# Altium footprint library Package_DFN_QFN.PcbLib: 735 footprints (part 22 of 46)
Each footprint in its own frame and in the unit in brackets; x right, y up, seen from the top. Pads: shape width x height; smd on the part's side, far side on the other; paste and mask are expansions set on the pad; w line width, h text height; cw(c..) or ccw(c..) is an arc to the next point about the centre after c.
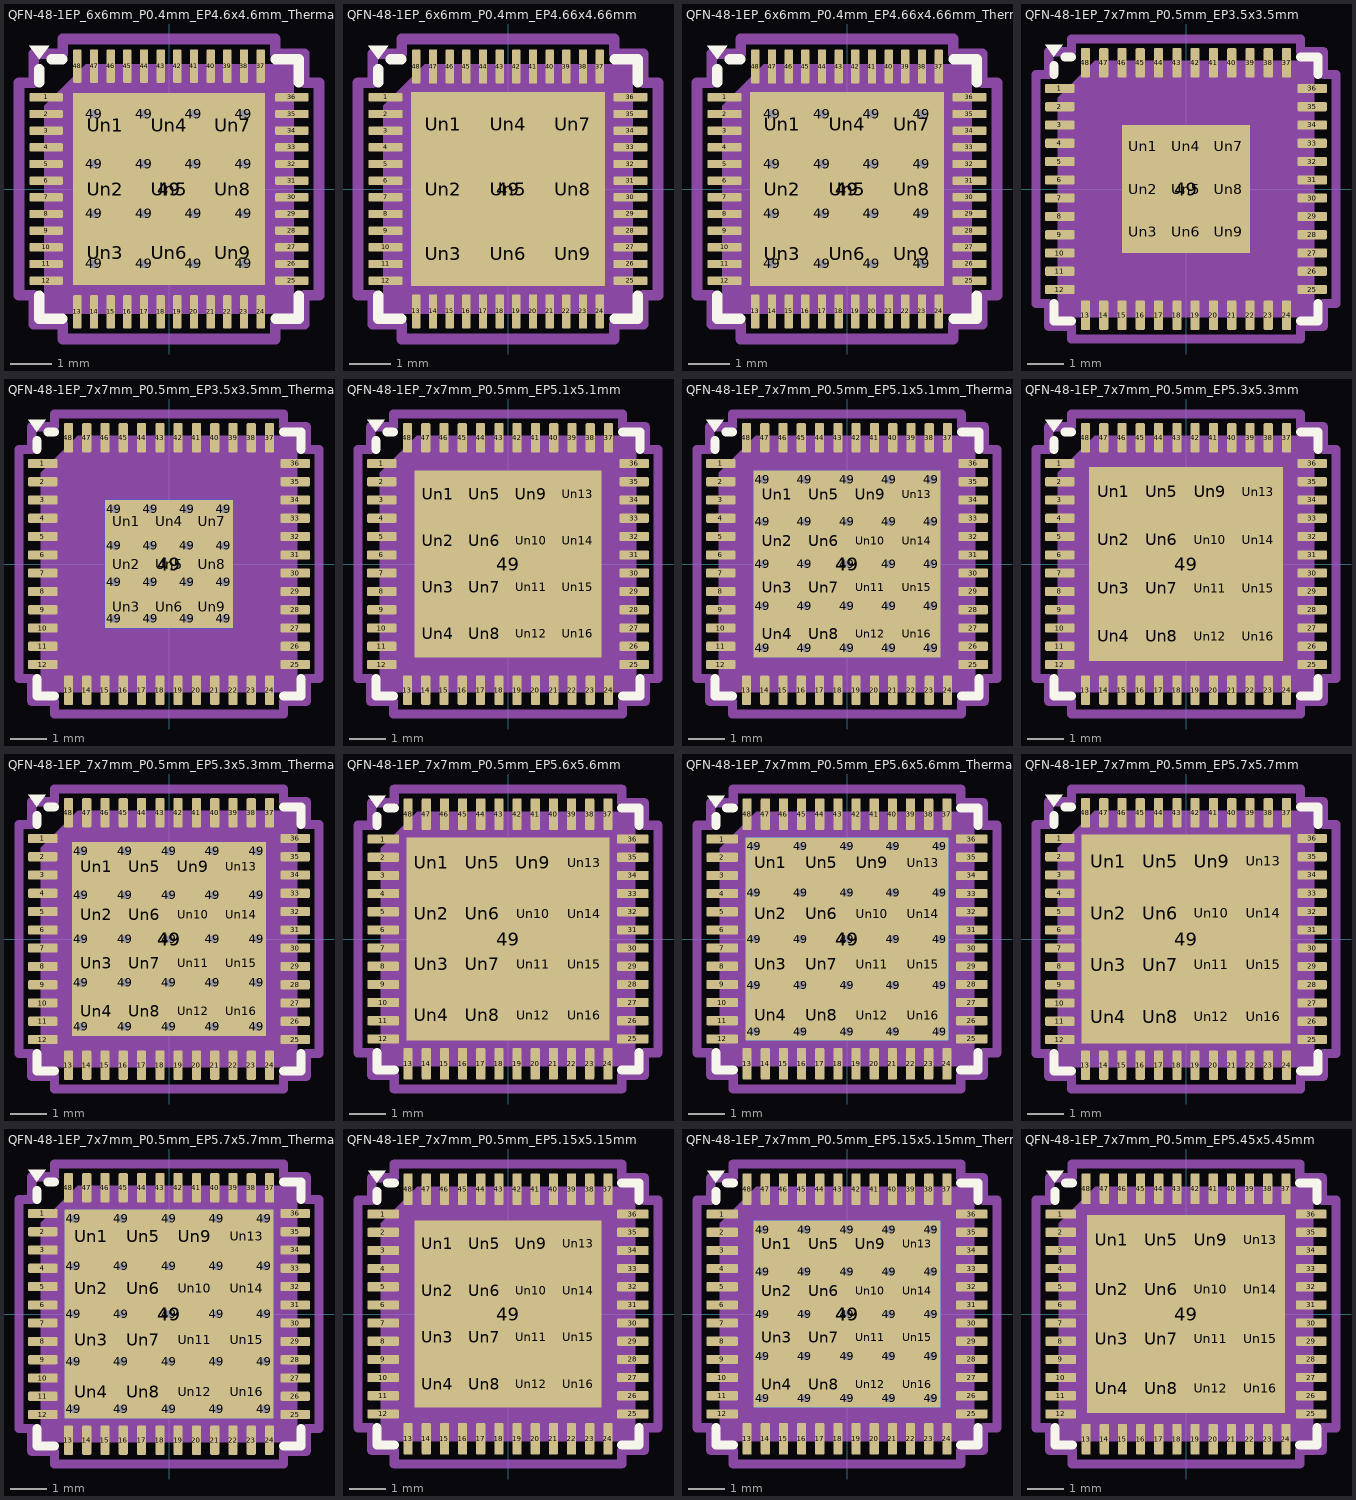
[diagram p21: the footprints below, top view; thin cyan lines are the x and y axes]

## QFN-48-1EP_6x6mm_P0.4mm_EP4.6x4.6mm_ThermalVias [mm] "QFN-48-1EP_6x6mm_P0.4mm_EP4.6x4.6mm_ThermalVias"
pads (75):
  rrect25% 0.8x0.2 smd: 1(-2.95,2.2) 2(-2.95,1.8) 3(-2.95,1.4) 4(-2.95,1) 5(-2.95,0.6) 6(-2.95,0.2) 7(-2.95,-0.2) 8(-2.95,-0.6) 9(-2.95,-1) 10(-2.95,-1.4) 11(-2.95,-1.8) 12(-2.95,-2.2) 25(2.95,-2.2) 26(2.95,-1.8) 27(2.95,-1.4) 28(2.95,-1) 29(2.95,-0.6) 30(2.95,-0.2) 31(2.95,0.2) 32(2.95,0.6) 33(2.95,1) 34(2.95,1.4) 35(2.95,1.8) 36(2.95,2.2)
  rrect25% 0.2x0.8 smd: 13(-2.2,-2.95) 14(-1.8,-2.95) 15(-1.4,-2.95) 16(-1,-2.95) 17(-0.6,-2.95) 18(-0.2,-2.95) 19(0.2,-2.95) 20(0.6,-2.95) 21(1,-2.95) 22(1.4,-2.95) 23(1.8,-2.95) 24(2.2,-2.95) 37(2.2,2.95) 38(1.8,2.95) 39(1.4,2.95) 40(1,2.95) 41(0.6,2.95) 42(0.2,2.95) 43(-0.2,2.95) 44(-0.6,2.95) 45(-1,2.95) 46(-1.4,2.95) 47(-1.8,2.95) 48(-2.2,2.95)
  round 0.5 hole 0.2: 49(-1.8,-1.8) 49(-1.8,-0.6) 49(-1.8,0.6) 49(-1.8,1.8) 49(-0.6,-1.8) 49(-0.6,-0.6) 49(-0.6,0.6) 49(-0.6,1.8) 49(0.6,-1.8) 49(0.6,-0.6) 49(0.6,0.6) 49(0.6,1.8) 49(1.8,-1.8) 49(1.8,-0.6) 49(1.8,0.6) 49(1.8,1.8)
  rect 4.6x4.6 smd: 49(0,0)
  rect 4.1x4.1 smd far side: 49(0,0)
  rrect20% 1.24x1.24 on Top Paste: Un1(-1.53,1.53) Un2(-1.53,0) Un3(-1.53,-1.53) Un4(0,1.53) Un5(0,0) Un6(0,-1.53) Un7(1.53,1.53) Un8(1.53,0) Un9(1.53,-1.53)
F.SilkS:
  region: -3.11,3.11 -3.35,3.44 -2.87,3.44
  lines w0.254: -3.11,-2.56 -3.11,-3.11 -2.56,-3.11 ; -3.11,2.56 -3.11,2.87 ; -2.81,3.11 -2.56,3.11 ; 2.56,-3.11 3.11,-3.11 3.11,-2.56 ; 2.56,3.11 3.11,3.11 3.11,2.56
Top Component Center:
  lines w0.127: -0.127,0 0.127,0 -0.127,0 ; 0,-0.127 0,0.127 0,-0.127
Top Assembly:
  region: 3,-3 -3,-3 -3,2 -2,3 3,3
Top Courtyard:
  lines w0.254: -3.6,-2.55 -3.25,-2.55 -3.25,-3.25 -2.55,-3.25 -2.55,-3.6 2.55,-3.6 2.55,-3.25 3.25,-3.25 3.25,-2.55 3.6,-2.55 3.6,2.55 3.25,2.55 3.25,3.25 2.55,3.25 2.55,3.6 -2.55,3.6 -2.55,3.25 -3.25,3.25 -3.25,2.55 -3.6,2.55 -3.6,-2.55
Top Designator:
  text ".Designator" at -3.43,-0.344 h1.52

## QFN-48-1EP_6x6mm_P0.4mm_EP4.66x4.66mm [mm] "QFN-48-1EP_6x6mm_P0.4mm_EP4.66x4.66mm"
pads (58):
  rrect25% 0.82x0.2 smd: 1(-2.94,2.2) 2(-2.94,1.8) 3(-2.94,1.4) 4(-2.94,1) 5(-2.94,0.6) 6(-2.94,0.2) 7(-2.94,-0.2) 8(-2.94,-0.6) 9(-2.94,-1) 10(-2.94,-1.4) 11(-2.94,-1.8) 12(-2.94,-2.2) 25(2.94,-2.2) 26(2.94,-1.8) 27(2.94,-1.4) 28(2.94,-1) 29(2.94,-0.6) 30(2.94,-0.2) 31(2.94,0.2) 32(2.94,0.6) 33(2.94,1) 34(2.94,1.4) 35(2.94,1.8) 36(2.94,2.2)
  rrect25% 0.2x0.82 smd: 13(-2.2,-2.94) 14(-1.8,-2.94) 15(-1.4,-2.94) 16(-1,-2.94) 17(-0.6,-2.94) 18(-0.2,-2.94) 19(0.2,-2.94) 20(0.6,-2.94) 21(1,-2.94) 22(1.4,-2.94) 23(1.8,-2.94) 24(2.2,-2.94) 37(2.2,2.94) 38(1.8,2.94) 39(1.4,2.94) 40(1,2.94) 41(0.6,2.94) 42(0.2,2.94) 43(-0.2,2.94) 44(-0.6,2.94) 45(-1,2.94) 46(-1.4,2.94) 47(-1.8,2.94) 48(-2.2,2.94)
  rect 4.66x4.66 smd: 49(0,0)
  rrect20% 1.25x1.25 on Top Paste: Un1(-1.55,1.55) Un2(-1.55,0) Un3(-1.55,-1.55) Un4(0,1.55) Un5(0,0) Un6(0,-1.55) Un7(1.55,1.55) Un8(1.55,0) Un9(1.55,-1.55)
F.SilkS:
  region: -3.11,3.11 -3.35,3.44 -2.87,3.44
  lines w0.254: -3.11,-2.56 -3.11,-3.11 -2.56,-3.11 ; -3.11,2.56 -3.11,2.87 ; -2.81,3.11 -2.56,3.11 ; 2.56,-3.11 3.11,-3.11 3.11,-2.56 ; 2.56,3.11 3.11,3.11 3.11,2.56
Top Component Center:
  lines w0.127: -0.127,0 0.127,0 -0.127,0 ; 0,-0.127 0,0.127 0,-0.127
Top Assembly:
  region: 3,-3 -3,-3 -3,2 -2,3 3,3
Top Courtyard:
  lines w0.254: -3.6,-2.55 -3.25,-2.55 -3.25,-3.25 -2.55,-3.25 -2.55,-3.6 2.55,-3.6 2.55,-3.25 3.25,-3.25 3.25,-2.55 3.6,-2.55 3.6,2.55 3.25,2.55 3.25,3.25 2.55,3.25 2.55,3.6 -2.55,3.6 -2.55,3.25 -3.25,3.25 -3.25,2.55 -3.6,2.55 -3.6,-2.55
Top Designator:
  text ".Designator" at -3.43,-0.344 h1.52

## QFN-48-1EP_6x6mm_P0.4mm_EP4.66x4.66mm_ThermalVias [mm] "QFN-48-1EP_6x6mm_P0.4mm_EP4.66x4.66mm_ThermalVias"
pads (75):
  rrect25% 0.82x0.2 smd: 1(-2.94,2.2) 2(-2.94,1.8) 3(-2.94,1.4) 4(-2.94,1) 5(-2.94,0.6) 6(-2.94,0.2) 7(-2.94,-0.2) 8(-2.94,-0.6) 9(-2.94,-1) 10(-2.94,-1.4) 11(-2.94,-1.8) 12(-2.94,-2.2) 25(2.94,-2.2) 26(2.94,-1.8) 27(2.94,-1.4) 28(2.94,-1) 29(2.94,-0.6) 30(2.94,-0.2) 31(2.94,0.2) 32(2.94,0.6) 33(2.94,1) 34(2.94,1.4) 35(2.94,1.8) 36(2.94,2.2)
  rrect25% 0.2x0.82 smd: 13(-2.2,-2.94) 14(-1.8,-2.94) 15(-1.4,-2.94) 16(-1,-2.94) 17(-0.6,-2.94) 18(-0.2,-2.94) 19(0.2,-2.94) 20(0.6,-2.94) 21(1,-2.94) 22(1.4,-2.94) 23(1.8,-2.94) 24(2.2,-2.94) 37(2.2,2.94) 38(1.8,2.94) 39(1.4,2.94) 40(1,2.94) 41(0.6,2.94) 42(0.2,2.94) 43(-0.2,2.94) 44(-0.6,2.94) 45(-1,2.94) 46(-1.4,2.94) 47(-1.8,2.94) 48(-2.2,2.94)
  round 0.5 hole 0.2: 49(-1.8,-1.8) 49(-1.8,-0.6) 49(-1.8,0.6) 49(-1.8,1.8) 49(-0.6,-1.8) 49(-0.6,-0.6) 49(-0.6,0.6) 49(-0.6,1.8) 49(0.6,-1.8) 49(0.6,-0.6) 49(0.6,0.6) 49(0.6,1.8) 49(1.8,-1.8) 49(1.8,-0.6) 49(1.8,0.6) 49(1.8,1.8)
  rect 4.66x4.66 smd: 49(0,0)
  rect 4.1x4.1 smd far side: 49(0,0)
  rrect20% 1.25x1.25 on Top Paste: Un1(-1.55,1.55) Un2(-1.55,0) Un3(-1.55,-1.55) Un4(0,1.55) Un5(0,0) Un6(0,-1.55) Un7(1.55,1.55) Un8(1.55,0) Un9(1.55,-1.55)
F.SilkS:
  region: -3.11,3.11 -3.35,3.44 -2.87,3.44
  lines w0.254: -3.11,-2.56 -3.11,-3.11 -2.56,-3.11 ; -3.11,2.56 -3.11,2.87 ; -2.81,3.11 -2.56,3.11 ; 2.56,-3.11 3.11,-3.11 3.11,-2.56 ; 2.56,3.11 3.11,3.11 3.11,2.56
Top Component Center:
  lines w0.127: -0.127,0 0.127,0 -0.127,0 ; 0,-0.127 0,0.127 0,-0.127
Top Assembly:
  region: 3,-3 -3,-3 -3,2 -2,3 3,3
Top Courtyard:
  lines w0.254: -3.6,-2.55 -3.25,-2.55 -3.25,-3.25 -2.55,-3.25 -2.55,-3.6 2.55,-3.6 2.55,-3.25 3.25,-3.25 3.25,-2.55 3.6,-2.55 3.6,2.55 3.25,2.55 3.25,3.25 2.55,3.25 2.55,3.6 -2.55,3.6 -2.55,3.25 -3.25,3.25 -3.25,2.55 -3.6,2.55 -3.6,-2.55
Top Designator:
  text ".Designator" at -3.43,-0.344 h1.52

## QFN-48-1EP_7x7mm_P0.5mm_EP3.5x3.5mm [mm] "QFN-48-1EP_7x7mm_P0.5mm_EP3.5x3.5mm"
pads (58):
  rrect25% 0.8x0.25 smd: 1(-3.45,2.75) 2(-3.45,2.25) 3(-3.45,1.75) 4(-3.45,1.25) 5(-3.45,0.75) 6(-3.45,0.25) 7(-3.45,-0.25) 8(-3.45,-0.75) 9(-3.45,-1.25) 10(-3.45,-1.75) 11(-3.45,-2.25) 12(-3.45,-2.75) 25(3.45,-2.75) 26(3.45,-2.25) 27(3.45,-1.75) 28(3.45,-1.25) 29(3.45,-0.75) 30(3.45,-0.25) 31(3.45,0.25) 32(3.45,0.75) 33(3.45,1.25) 34(3.45,1.75) 35(3.45,2.25) 36(3.45,2.75)
  rrect25% 0.25x0.8 smd: 13(-2.75,-3.45) 14(-2.25,-3.45) 15(-1.75,-3.45) 16(-1.25,-3.45) 17(-0.75,-3.45) 18(-0.25,-3.45) 19(0.25,-3.45) 20(0.75,-3.45) 21(1.25,-3.45) 22(1.75,-3.45) 23(2.25,-3.45) 24(2.75,-3.45) 37(2.75,3.45) 38(2.25,3.45) 39(1.75,3.45) 40(1.25,3.45) 41(0.75,3.45) 42(0.25,3.45) 43(-0.25,3.45) 44(-0.75,3.45) 45(-1.25,3.45) 46(-1.75,3.45) 47(-2.25,3.45) 48(-2.75,3.45)
  rect 3.5x3.5 smd: 49(0,0)
  rrect25% 0.94x0.94 on Top Paste: Un1(-1.17,1.17) Un2(-1.17,0) Un3(-1.17,-1.17) Un4(0,1.17) Un5(0,0) Un6(0,-1.17) Un7(1.17,1.17) Un8(1.17,0) Un9(1.17,-1.17)
F.SilkS:
  region: -3.61,3.61 -3.85,3.94 -3.37,3.94
  lines w0.254: -3.61,-3.135 -3.61,-3.61 -3.135,-3.61 ; -3.61,3.135 -3.61,3.37 ; -3.31,3.61 -3.135,3.61 ; 3.135,-3.61 3.61,-3.61 3.61,-3.135 ; 3.135,3.61 3.61,3.61 3.61,3.135
Top Component Center:
  lines w0.127: -0.127,0 0.127,0 -0.127,0 ; 0,-0.127 0,0.127 0,-0.127
Top Assembly:
  region: 3.5,-3.5 -3.5,-3.5 -3.5,2.5 -2.5,3.5 3.5,3.5
Top Courtyard:
  lines w0.254: -4.1,-3.13 -3.75,-3.13 -3.75,-3.75 -3.13,-3.75 -3.13,-4.1 3.13,-4.1 3.13,-3.75 3.75,-3.75 3.75,-3.13 4.1,-3.13 4.1,3.13 3.75,3.13 3.75,3.75 3.13,3.75 3.13,4.1 -3.13,4.1 -3.13,3.75 -3.75,3.75 -3.75,3.13 -4.1,3.13 -4.1,-3.13
Top Designator:
  text ".Designator" at -3.43,-0.344 h1.52
3D body "QFN-48-1EP_7x7mm_P0.5mm_EP5.15x5.15mm.step": height 0.77, standoff 0, extent -3.5,-3.5 3.5,3.5

## QFN-48-1EP_7x7mm_P0.5mm_EP3.5x3.5mm_ThermalVias [mm] "QFN-48-1EP_7x7mm_P0.5mm_EP3.5x3.5mm_ThermalVias"
pads (75):
  rrect25% 0.8x0.25 smd: 1(-3.45,2.75) 2(-3.45,2.25) 3(-3.45,1.75) 4(-3.45,1.25) 5(-3.45,0.75) 6(-3.45,0.25) 7(-3.45,-0.25) 8(-3.45,-0.75) 9(-3.45,-1.25) 10(-3.45,-1.75) 11(-3.45,-2.25) 12(-3.45,-2.75) 25(3.45,-2.75) 26(3.45,-2.25) 27(3.45,-1.75) 28(3.45,-1.25) 29(3.45,-0.75) 30(3.45,-0.25) 31(3.45,0.25) 32(3.45,0.75) 33(3.45,1.25) 34(3.45,1.75) 35(3.45,2.25) 36(3.45,2.75)
  rrect25% 0.25x0.8 smd: 13(-2.75,-3.45) 14(-2.25,-3.45) 15(-1.75,-3.45) 16(-1.25,-3.45) 17(-0.75,-3.45) 18(-0.25,-3.45) 19(0.25,-3.45) 20(0.75,-3.45) 21(1.25,-3.45) 22(1.75,-3.45) 23(2.25,-3.45) 24(2.75,-3.45) 37(2.75,3.45) 38(2.25,3.45) 39(1.75,3.45) 40(1.25,3.45) 41(0.75,3.45) 42(0.25,3.45) 43(-0.25,3.45) 44(-0.75,3.45) 45(-1.25,3.45) 46(-1.75,3.45) 47(-2.25,3.45) 48(-2.75,3.45)
  round 0.5 hole 0.2: 49(-1.5,-1.5) 49(-1.5,-0.5) 49(-1.5,0.5) 49(-1.5,1.5) 49(-0.5,-1.5) 49(-0.5,-0.5) 49(-0.5,0.5) 49(-0.5,1.5) 49(0.5,-1.5) 49(0.5,-0.5) 49(0.5,0.5) 49(0.5,1.5) 49(1.5,-1.5) 49(1.5,-0.5) 49(1.5,0.5) 49(1.5,1.5)
  rect 3.5x3.5 smd: 49(0,0)
  rect 3.5x3.5 smd far side: 49(0,0)
  rrect25% 0.9x0.9 on Top Paste: Un1(-1.17,1.17) Un2(-1.17,0) Un3(-1.17,-1.17) Un4(0,1.17) Un5(0,0) Un6(0,-1.17) Un7(1.17,1.17) Un8(1.17,0) Un9(1.17,-1.17)
F.SilkS:
  region: -3.61,3.61 -3.85,3.94 -3.37,3.94
  lines w0.254: -3.61,-3.135 -3.61,-3.61 -3.135,-3.61 ; -3.61,3.135 -3.61,3.37 ; -3.31,3.61 -3.135,3.61 ; 3.135,-3.61 3.61,-3.61 3.61,-3.135 ; 3.135,3.61 3.61,3.61 3.61,3.135
Top Component Center:
  lines w0.127: -0.127,0 0.127,0 -0.127,0 ; 0,-0.127 0,0.127 0,-0.127
Top Assembly:
  region: 3.5,-3.5 -3.5,-3.5 -3.5,2.5 -2.5,3.5 3.5,3.5
Top Courtyard:
  lines w0.254: -4.1,-3.13 -3.75,-3.13 -3.75,-3.75 -3.13,-3.75 -3.13,-4.1 3.13,-4.1 3.13,-3.75 3.75,-3.75 3.75,-3.13 4.1,-3.13 4.1,3.13 3.75,3.13 3.75,3.75 3.13,3.75 3.13,4.1 -3.13,4.1 -3.13,3.75 -3.75,3.75 -3.75,3.13 -4.1,3.13 -4.1,-3.13
Top Designator:
  text ".Designator" at -3.43,-0.344 h1.52
3D body "QFN-48-1EP_7x7mm_P0.5mm_EP5.15x5.15mm.step": height 0.77, standoff 0, extent -3.5,-3.5 3.5,3.5

## QFN-48-1EP_7x7mm_P0.5mm_EP5.1x5.1mm [mm] "QFN-48-1EP_7x7mm_P0.5mm_EP5.1x5.1mm"
pads (65):
  rrect25% 0.8x0.25 smd: 1(-3.45,2.75) 2(-3.45,2.25) 3(-3.45,1.75) 4(-3.45,1.25) 5(-3.45,0.75) 6(-3.45,0.25) 7(-3.45,-0.25) 8(-3.45,-0.75) 9(-3.45,-1.25) 10(-3.45,-1.75) 11(-3.45,-2.25) 12(-3.45,-2.75) 25(3.45,-2.75) 26(3.45,-2.25) 27(3.45,-1.75) 28(3.45,-1.25) 29(3.45,-0.75) 30(3.45,-0.25) 31(3.45,0.25) 32(3.45,0.75) 33(3.45,1.25) 34(3.45,1.75) 35(3.45,2.25) 36(3.45,2.75)
  rrect25% 0.25x0.8 smd: 13(-2.75,-3.45) 14(-2.25,-3.45) 15(-1.75,-3.45) 16(-1.25,-3.45) 17(-0.75,-3.45) 18(-0.25,-3.45) 19(0.25,-3.45) 20(0.75,-3.45) 21(1.25,-3.45) 22(1.75,-3.45) 23(2.25,-3.45) 24(2.75,-3.45) 37(2.75,3.45) 38(2.25,3.45) 39(1.75,3.45) 40(1.25,3.45) 41(0.75,3.45) 42(0.25,3.45) 43(-0.25,3.45) 44(-0.75,3.45) 45(-1.25,3.45) 46(-1.75,3.45) 47(-2.25,3.45) 48(-2.75,3.45)
  rect 5.1x5.1 smd: 49(0,0)
  rrect24% 1.03x1.03 on Top Paste: Un1(-1.905,1.905) Un2(-1.905,0.635) Un3(-1.905,-0.635) Un4(-1.905,-1.905) Un5(-0.635,1.905) Un6(-0.635,0.635) Un7(-0.635,-0.635) Un8(-0.635,-1.905) Un9(0.635,1.905) Un10(0.635,0.635) Un11(0.635,-0.635) Un12(0.635,-1.905) Un13(1.905,1.905) Un14(1.905,0.635) Un15(1.905,-0.635) Un16(1.905,-1.905)
F.SilkS:
  region: -3.61,3.61 -3.85,3.94 -3.37,3.94
  lines w0.254: -3.61,-3.135 -3.61,-3.61 -3.135,-3.61 ; -3.61,3.135 -3.61,3.37 ; -3.31,3.61 -3.135,3.61 ; 3.135,-3.61 3.61,-3.61 3.61,-3.135 ; 3.135,3.61 3.61,3.61 3.61,3.135
Top Component Center:
  lines w0.127: -0.127,0 0.127,0 -0.127,0 ; 0,-0.127 0,0.127 0,-0.127
Top Assembly:
  region: 3.5,-3.5 -3.5,-3.5 -3.5,2.5 -2.5,3.5 3.5,3.5
Top Courtyard:
  lines w0.254: -4.1,-3.13 -4.1,3.13 -3.75,3.13 -3.75,3.75 -3.13,3.75 -3.13,4.1 3.13,4.1 3.13,3.75 3.75,3.75 3.75,3.13 4.1,3.13 4.1,-3.13 3.75,-3.13 3.75,-3.75 3.13,-3.75 3.13,-4.1 -3.13,-4.1 -3.13,-3.75 -3.75,-3.75 -3.75,-3.13 -4.1,-3.13
Top Designator:
  text ".Designator" at -3.43,-0.344 h1.52
3D body "QFN-48-1EP_7x7mm_P0.5mm_EP5.15x5.15mm.step": height 0.77, standoff 0, extent -3.5,-3.5 3.5,3.5

## QFN-48-1EP_7x7mm_P0.5mm_EP5.1x5.1mm_ThermalVias [mm] "QFN-48-1EP_7x7mm_P0.5mm_EP5.1x5.1mm_ThermalVias"
pads (91):
  rrect25% 0.8x0.25 smd: 1(-3.45,2.75) 2(-3.45,2.25) 3(-3.45,1.75) 4(-3.45,1.25) 5(-3.45,0.75) 6(-3.45,0.25) 7(-3.45,-0.25) 8(-3.45,-0.75) 9(-3.45,-1.25) 10(-3.45,-1.75) 11(-3.45,-2.25) 12(-3.45,-2.75) 25(3.45,-2.75) 26(3.45,-2.25) 27(3.45,-1.75) 28(3.45,-1.25) 29(3.45,-0.75) 30(3.45,-0.25) 31(3.45,0.25) 32(3.45,0.75) 33(3.45,1.25) 34(3.45,1.75) 35(3.45,2.25) 36(3.45,2.75)
  rrect25% 0.25x0.8 smd: 13(-2.75,-3.45) 14(-2.25,-3.45) 15(-1.75,-3.45) 16(-1.25,-3.45) 17(-0.75,-3.45) 18(-0.25,-3.45) 19(0.25,-3.45) 20(0.75,-3.45) 21(1.25,-3.45) 22(1.75,-3.45) 23(2.25,-3.45) 24(2.75,-3.45) 37(2.75,3.45) 38(2.25,3.45) 39(1.75,3.45) 40(1.25,3.45) 41(0.75,3.45) 42(0.25,3.45) 43(-0.25,3.45) 44(-0.75,3.45) 45(-1.25,3.45) 46(-1.75,3.45) 47(-2.25,3.45) 48(-2.75,3.45)
  round 0.5 hole 0.2: 49(-2.3,-2.3) 49(-2.3,-1.15) 49(-2.3,0) 49(-2.3,1.15) 49(-2.3,2.3) 49(-1.15,-2.3) 49(-1.15,-1.15) 49(-1.15,0) 49(-1.15,1.15) 49(-1.15,2.3) 49(0,-2.3) 49(0,-1.15) 49(0,0) 49(0,1.15) 49(0,2.3) 49(1.15,-2.3) 49(1.15,-1.15) 49(1.15,0) 49(1.15,1.15) 49(1.15,2.3) 49(2.3,-2.3) 49(2.3,-1.15) 49(2.3,0) 49(2.3,1.15) 49(2.3,2.3)
  rect 5.1x5.1 smd: 49(0,0)
  rect 5.1x5.1 smd far side: 49(0,0)
  rrect25% 0.99x0.99 on Top Paste: Un1(-1.905,1.905) Un2(-1.905,0.635) Un3(-1.905,-0.635) Un4(-1.905,-1.905) Un5(-0.635,1.905) Un6(-0.635,0.635) Un7(-0.635,-0.635) Un8(-0.635,-1.905) Un9(0.635,1.905) Un10(0.635,0.635) Un11(0.635,-0.635) Un12(0.635,-1.905) Un13(1.905,1.905) Un14(1.905,0.635) Un15(1.905,-0.635) Un16(1.905,-1.905)
F.SilkS:
  region: -3.61,3.61 -3.85,3.94 -3.37,3.94
  lines w0.254: -3.61,-3.135 -3.61,-3.61 -3.135,-3.61 ; -3.61,3.135 -3.61,3.37 ; -3.31,3.61 -3.135,3.61 ; 3.135,-3.61 3.61,-3.61 3.61,-3.135 ; 3.135,3.61 3.61,3.61 3.61,3.135
Top Component Center:
  lines w0.127: -0.127,0 0.127,0 -0.127,0 ; 0,-0.127 0,0.127 0,-0.127
Top Assembly:
  region: 3.5,-3.5 -3.5,-3.5 -3.5,2.5 -2.5,3.5 3.5,3.5
Top Courtyard:
  lines w0.254: -4.1,-3.13 -3.75,-3.13 -3.75,-3.75 -3.13,-3.75 -3.13,-4.1 3.13,-4.1 3.13,-3.75 3.75,-3.75 3.75,-3.13 4.1,-3.13 4.1,3.13 3.75,3.13 3.75,3.75 3.13,3.75 3.13,4.1 -3.13,4.1 -3.13,3.75 -3.75,3.75 -3.75,3.13 -4.1,3.13 -4.1,-3.13
Top Designator:
  text ".Designator" at -3.43,-0.344 h1.52
3D body "QFN-48-1EP_7x7mm_P0.5mm_EP5.15x5.15mm.step": height 0.77, standoff 0, extent -3.5,-3.5 3.5,3.5

## QFN-48-1EP_7x7mm_P0.5mm_EP5.3x5.3mm [mm] "QFN-48-1EP_7x7mm_P0.5mm_EP5.3x5.3mm"
pads (65):
  rrect25% 0.8x0.25 smd: 1(-3.45,2.75) 2(-3.45,2.25) 3(-3.45,1.75) 4(-3.45,1.25) 5(-3.45,0.75) 6(-3.45,0.25) 7(-3.45,-0.25) 8(-3.45,-0.75) 9(-3.45,-1.25) 10(-3.45,-1.75) 11(-3.45,-2.25) 12(-3.45,-2.75) 25(3.45,-2.75) 26(3.45,-2.25) 27(3.45,-1.75) 28(3.45,-1.25) 29(3.45,-0.75) 30(3.45,-0.25) 31(3.45,0.25) 32(3.45,0.75) 33(3.45,1.25) 34(3.45,1.75) 35(3.45,2.25) 36(3.45,2.75)
  rrect25% 0.25x0.8 smd: 13(-2.75,-3.45) 14(-2.25,-3.45) 15(-1.75,-3.45) 16(-1.25,-3.45) 17(-0.75,-3.45) 18(-0.25,-3.45) 19(0.25,-3.45) 20(0.75,-3.45) 21(1.25,-3.45) 22(1.75,-3.45) 23(2.25,-3.45) 24(2.75,-3.45) 37(2.75,3.45) 38(2.25,3.45) 39(1.75,3.45) 40(1.25,3.45) 41(0.75,3.45) 42(0.25,3.45) 43(-0.25,3.45) 44(-0.75,3.45) 45(-1.25,3.45) 46(-1.75,3.45) 47(-2.25,3.45) 48(-2.75,3.45)
  rect 5.3x5.3 smd: 49(0,0)
  rrect23% 1.07x1.07 on Top Paste: Un1(-1.98,1.98) Un2(-1.98,0.66) Un3(-1.98,-0.66) Un4(-1.98,-1.98) Un5(-0.66,1.98) Un6(-0.66,0.66) Un7(-0.66,-0.66) Un8(-0.66,-1.98) Un9(0.66,1.98) Un10(0.66,0.66) Un11(0.66,-0.66) Un12(0.66,-1.98) Un13(1.98,1.98) Un14(1.98,0.66) Un15(1.98,-0.66) Un16(1.98,-1.98)
F.SilkS:
  region: -3.61,3.61 -3.85,3.94 -3.37,3.94
  lines w0.254: -3.61,-3.135 -3.61,-3.61 -3.135,-3.61 ; -3.61,3.135 -3.61,3.37 ; -3.31,3.61 -3.135,3.61 ; 3.135,-3.61 3.61,-3.61 3.61,-3.135 ; 3.135,3.61 3.61,3.61 3.61,3.135
Top Component Center:
  lines w0.127: -0.127,0 0.127,0 -0.127,0 ; 0,-0.127 0,0.127 0,-0.127
Top Assembly:
  region: 3.5,-3.5 -3.5,-3.5 -3.5,2.5 -2.5,3.5 3.5,3.5
Top Courtyard:
  lines w0.254: -4.1,-3.13 -4.1,3.13 -3.75,3.13 -3.75,3.75 -3.13,3.75 -3.13,4.1 3.13,4.1 3.13,3.75 3.75,3.75 3.75,3.13 4.1,3.13 4.1,-3.13 3.75,-3.13 3.75,-3.75 3.13,-3.75 3.13,-4.1 -3.13,-4.1 -3.13,-3.75 -3.75,-3.75 -3.75,-3.13 -4.1,-3.13
Top Designator:
  text ".Designator" at -3.43,-0.344 h1.52
3D body "QFN-48-1EP_7x7mm_P0.5mm_EP5.15x5.15mm.step": height 0.77, standoff 0, extent -3.5,-3.5 3.5,3.5

## QFN-48-1EP_7x7mm_P0.5mm_EP5.3x5.3mm_ThermalVias [mm] "QFN-48-1EP_7x7mm_P0.5mm_EP5.3x5.3mm_ThermalVias"
pads (91):
  rrect25% 0.8x0.25 smd: 1(-3.45,2.75) 2(-3.45,2.25) 3(-3.45,1.75) 4(-3.45,1.25) 5(-3.45,0.75) 6(-3.45,0.25) 7(-3.45,-0.25) 8(-3.45,-0.75) 9(-3.45,-1.25) 10(-3.45,-1.75) 11(-3.45,-2.25) 12(-3.45,-2.75) 25(3.45,-2.75) 26(3.45,-2.25) 27(3.45,-1.75) 28(3.45,-1.25) 29(3.45,-0.75) 30(3.45,-0.25) 31(3.45,0.25) 32(3.45,0.75) 33(3.45,1.25) 34(3.45,1.75) 35(3.45,2.25) 36(3.45,2.75)
  rrect25% 0.25x0.8 smd: 13(-2.75,-3.45) 14(-2.25,-3.45) 15(-1.75,-3.45) 16(-1.25,-3.45) 17(-0.75,-3.45) 18(-0.25,-3.45) 19(0.25,-3.45) 20(0.75,-3.45) 21(1.25,-3.45) 22(1.75,-3.45) 23(2.25,-3.45) 24(2.75,-3.45) 37(2.75,3.45) 38(2.25,3.45) 39(1.75,3.45) 40(1.25,3.45) 41(0.75,3.45) 42(0.25,3.45) 43(-0.25,3.45) 44(-0.75,3.45) 45(-1.25,3.45) 46(-1.75,3.45) 47(-2.25,3.45) 48(-2.75,3.45)
  round 0.5 hole 0.2: 49(-2.4,-2.4) 49(-2.4,-1.2) 49(-2.4,0) 49(-2.4,1.2) 49(-2.4,2.4) 49(-1.2,-2.4) 49(-1.2,-1.2) 49(-1.2,0) 49(-1.2,1.2) 49(-1.2,2.4) 49(0,-2.4) 49(0,-1.2) 49(0,0) 49(0,1.2) 49(0,2.4) 49(1.2,-2.4) 49(1.2,-1.2) 49(1.2,0) 49(1.2,1.2) 49(1.2,2.4) 49(2.4,-2.4) 49(2.4,-1.2) 49(2.4,0) 49(2.4,1.2) 49(2.4,2.4)
  rect 5.3x5.3 smd: 49(0,0)
  rect 5.3x5.3 smd far side: 49(0,0)
  rrect24% 1.03x1.03 on Top Paste: Un1(-1.98,1.98) Un2(-1.98,0.66) Un3(-1.98,-0.66) Un4(-1.98,-1.98) Un5(-0.66,1.98) Un6(-0.66,0.66) Un7(-0.66,-0.66) Un8(-0.66,-1.98) Un9(0.66,1.98) Un10(0.66,0.66) Un11(0.66,-0.66) Un12(0.66,-1.98) Un13(1.98,1.98) Un14(1.98,0.66) Un15(1.98,-0.66) Un16(1.98,-1.98)
F.SilkS:
  region: -3.61,3.61 -3.85,3.94 -3.37,3.94
  lines w0.254: -3.61,-3.135 -3.61,-3.61 -3.135,-3.61 ; -3.61,3.135 -3.61,3.37 ; -3.31,3.61 -3.135,3.61 ; 3.135,-3.61 3.61,-3.61 3.61,-3.135 ; 3.135,3.61 3.61,3.61 3.61,3.135
Top Component Center:
  lines w0.127: -0.127,0 0.127,0 -0.127,0 ; 0,-0.127 0,0.127 0,-0.127
Top Assembly:
  region: 3.5,-3.5 -3.5,-3.5 -3.5,2.5 -2.5,3.5 3.5,3.5
Top Courtyard:
  lines w0.254: -4.1,-3.13 -4.1,3.13 -3.75,3.13 -3.75,3.75 -3.13,3.75 -3.13,4.1 3.13,4.1 3.13,3.75 3.75,3.75 3.75,3.13 4.1,3.13 4.1,-3.13 3.75,-3.13 3.75,-3.75 3.13,-3.75 3.13,-4.1 -3.13,-4.1 -3.13,-3.75 -3.75,-3.75 -3.75,-3.13 -4.1,-3.13
Top Designator:
  text ".Designator" at -3.43,-0.344 h1.52
3D body "QFN-48-1EP_7x7mm_P0.5mm_EP5.15x5.15mm.step": height 0.77, standoff 0, extent -3.5,-3.5 3.5,3.5

## QFN-48-1EP_7x7mm_P0.5mm_EP5.6x5.6mm [mm] "QFN-48-1EP_7x7mm_P0.5mm_EP5.6x5.6mm"
pads (65):
  rrect25% 0.875x0.25 smd: 1(-3.437,2.75) 2(-3.437,2.25) 3(-3.437,1.75) 4(-3.437,1.25) 5(-3.437,0.75) 6(-3.437,0.25) 7(-3.437,-0.25) 8(-3.437,-0.75) 9(-3.437,-1.25) 10(-3.437,-1.75) 11(-3.437,-2.25) 12(-3.437,-2.75) 25(3.437,-2.75) 26(3.437,-2.25) 27(3.437,-1.75) 28(3.437,-1.25) 29(3.437,-0.75) 30(3.437,-0.25) 31(3.437,0.25) 32(3.437,0.75) 33(3.437,1.25) 34(3.437,1.75) 35(3.437,2.25) 36(3.437,2.75)
  rrect25% 0.25x0.875 smd: 13(-2.75,-3.437) 14(-2.25,-3.437) 15(-1.75,-3.437) 16(-1.25,-3.437) 17(-0.75,-3.437) 18(-0.25,-3.437) 19(0.25,-3.437) 20(0.75,-3.437) 21(1.25,-3.437) 22(1.75,-3.437) 23(2.25,-3.437) 24(2.75,-3.437) 37(2.75,3.437) 38(2.25,3.437) 39(1.75,3.437) 40(1.25,3.437) 41(0.75,3.437) 42(0.25,3.437) 43(-0.25,3.437) 44(-0.75,3.437) 45(-1.25,3.437) 46(-1.75,3.437) 47(-2.25,3.437) 48(-2.75,3.437)
  rect 5.6x5.6 smd: 49(0,0)
  rrect22% 1.13x1.13 on Top Paste: Un1(-2.1,2.1) Un2(-2.1,0.7) Un3(-2.1,-0.7) Un4(-2.1,-2.1) Un5(-0.7,2.1) Un6(-0.7,0.7) Un7(-0.7,-0.7) Un8(-0.7,-2.1) Un9(0.7,2.1) Un10(0.7,0.7) Un11(0.7,-0.7) Un12(0.7,-2.1) Un13(2.1,2.1) Un14(2.1,0.7) Un15(2.1,-0.7) Un16(2.1,-2.1)
F.SilkS:
  region: -3.61,3.61 -3.85,3.94 -3.37,3.94
  lines w0.254: -3.61,-3.135 -3.61,-3.61 -3.135,-3.61 ; -3.61,3.135 -3.61,3.37 ; -3.31,3.61 -3.135,3.61 ; 3.135,-3.61 3.61,-3.61 3.61,-3.135 ; 3.135,3.61 3.61,3.61 3.61,3.135
Top Component Center:
  lines w0.127: -0.127,0 0.127,0 -0.127,0 ; 0,-0.127 0,0.127 0,-0.127
Top Assembly:
  region: 3.5,-3.5 -3.5,-3.5 -3.5,2.5 -2.5,3.5 3.5,3.5
Top Courtyard:
  lines w0.254: -4.13,-3.13 -4.13,3.13 -3.75,3.13 -3.75,3.75 -3.13,3.75 -3.13,4.13 3.13,4.13 3.13,3.75 3.75,3.75 3.75,3.13 4.13,3.13 4.13,-3.13 3.75,-3.13 3.75,-3.75 3.13,-3.75 3.13,-4.13 -3.13,-4.13 -3.13,-3.75 -3.75,-3.75 -3.75,-3.13 -4.13,-3.13
Top Designator:
  text ".Designator" at -3.43,-0.344 h1.52
3D body "QFN-48-1EP_7x7mm_P0.5mm_EP5.15x5.15mm.step": height 0.77, standoff 0, extent -3.5,-3.5 3.5,3.5

## QFN-48-1EP_7x7mm_P0.5mm_EP5.6x5.6mm_ThermalVias [mm] "QFN-48-1EP_7x7mm_P0.5mm_EP5.6x5.6mm_ThermalVias"
pads (91):
  rrect25% 0.875x0.25 smd: 1(-3.437,2.75) 2(-3.437,2.25) 3(-3.437,1.75) 4(-3.437,1.25) 5(-3.437,0.75) 6(-3.437,0.25) 7(-3.437,-0.25) 8(-3.437,-0.75) 9(-3.437,-1.25) 10(-3.437,-1.75) 11(-3.437,-2.25) 12(-3.437,-2.75) 25(3.437,-2.75) 26(3.437,-2.25) 27(3.437,-1.75) 28(3.437,-1.25) 29(3.437,-0.75) 30(3.437,-0.25) 31(3.437,0.25) 32(3.437,0.75) 33(3.437,1.25) 34(3.437,1.75) 35(3.437,2.25) 36(3.437,2.75)
  rrect25% 0.25x0.875 smd: 13(-2.75,-3.437) 14(-2.25,-3.437) 15(-1.75,-3.437) 16(-1.25,-3.437) 17(-0.75,-3.437) 18(-0.25,-3.437) 19(0.25,-3.437) 20(0.75,-3.437) 21(1.25,-3.437) 22(1.75,-3.437) 23(2.25,-3.437) 24(2.75,-3.437) 37(2.75,3.437) 38(2.25,3.437) 39(1.75,3.437) 40(1.25,3.437) 41(0.75,3.437) 42(0.25,3.437) 43(-0.25,3.437) 44(-0.75,3.437) 45(-1.25,3.437) 46(-1.75,3.437) 47(-2.25,3.437) 48(-2.75,3.437)
  round 0.5 hole 0.2: 49(-2.55,-2.55) 49(-2.55,-1.275) 49(-2.55,0) 49(-2.55,1.275) 49(-2.55,2.55) 49(-1.275,-2.55) 49(-1.275,-1.275) 49(-1.275,0) 49(-1.275,1.275) 49(-1.275,2.55) 49(0,-2.55) 49(0,-1.275) 49(0,0) 49(0,1.275) 49(0,2.55) 49(1.275,-2.55) 49(1.275,-1.275) 49(1.275,0) 49(1.275,1.275) 49(1.275,2.55) 49(2.55,-2.55) 49(2.55,-1.275) 49(2.55,0) 49(2.55,1.275) 49(2.55,2.55)
  rect 5.6x5.6 smd: 49(0,0)
  rect 5.6x5.6 smd far side: 49(0,0)
  rrect23% 1.08x1.08 on Top Paste: Un1(-2.1,2.1) Un2(-2.1,0.7) Un3(-2.1,-0.7) Un4(-2.1,-2.1) Un5(-0.7,2.1) Un6(-0.7,0.7) Un7(-0.7,-0.7) Un8(-0.7,-2.1) Un9(0.7,2.1) Un10(0.7,0.7) Un11(0.7,-0.7) Un12(0.7,-2.1) Un13(2.1,2.1) Un14(2.1,0.7) Un15(2.1,-0.7) Un16(2.1,-2.1)
F.SilkS:
  region: -3.61,3.61 -3.85,3.94 -3.37,3.94
  lines w0.254: -3.61,-3.135 -3.61,-3.61 -3.135,-3.61 ; -3.61,3.135 -3.61,3.37 ; -3.31,3.61 -3.135,3.61 ; 3.135,-3.61 3.61,-3.61 3.61,-3.135 ; 3.135,3.61 3.61,3.61 3.61,3.135
Top Component Center:
  lines w0.127: -0.127,0 0.127,0 -0.127,0 ; 0,-0.127 0,0.127 0,-0.127
Top Assembly:
  region: 3.5,-3.5 -3.5,-3.5 -3.5,2.5 -2.5,3.5 3.5,3.5
Top Courtyard:
  lines w0.254: -4.13,-3.13 -4.13,3.13 -3.75,3.13 -3.75,3.75 -3.13,3.75 -3.13,4.13 3.13,4.13 3.13,3.75 3.75,3.75 3.75,3.13 4.13,3.13 4.13,-3.13 3.75,-3.13 3.75,-3.75 3.13,-3.75 3.13,-4.13 -3.13,-4.13 -3.13,-3.75 -3.75,-3.75 -3.75,-3.13 -4.13,-3.13
Top Designator:
  text ".Designator" at -3.43,-0.344 h1.52
3D body "QFN-48-1EP_7x7mm_P0.5mm_EP5.15x5.15mm.step": height 0.77, standoff 0, extent -3.5,-3.5 3.5,3.5

## QFN-48-1EP_7x7mm_P0.5mm_EP5.7x5.7mm [mm] "QFN-48-1EP_7x7mm_P0.5mm_EP5.7x5.7mm"
pads (65):
  rrect25% 0.8x0.25 smd: 1(-3.45,2.75) 2(-3.45,2.25) 3(-3.45,1.75) 4(-3.45,1.25) 5(-3.45,0.75) 6(-3.45,0.25) 7(-3.45,-0.25) 8(-3.45,-0.75) 9(-3.45,-1.25) 10(-3.45,-1.75) 11(-3.45,-2.25) 12(-3.45,-2.75) 25(3.45,-2.75) 26(3.45,-2.25) 27(3.45,-1.75) 28(3.45,-1.25) 29(3.45,-0.75) 30(3.45,-0.25) 31(3.45,0.25) 32(3.45,0.75) 33(3.45,1.25) 34(3.45,1.75) 35(3.45,2.25) 36(3.45,2.75)
  rrect25% 0.25x0.8 smd: 13(-2.75,-3.45) 14(-2.25,-3.45) 15(-1.75,-3.45) 16(-1.25,-3.45) 17(-0.75,-3.45) 18(-0.25,-3.45) 19(0.25,-3.45) 20(0.75,-3.45) 21(1.25,-3.45) 22(1.75,-3.45) 23(2.25,-3.45) 24(2.75,-3.45) 37(2.75,3.45) 38(2.25,3.45) 39(1.75,3.45) 40(1.25,3.45) 41(0.75,3.45) 42(0.25,3.45) 43(-0.25,3.45) 44(-0.75,3.45) 45(-1.25,3.45) 46(-1.75,3.45) 47(-2.25,3.45) 48(-2.75,3.45)
  rect 5.7x5.7 smd: 49(0,0)
  rrect22% 1.15x1.15 on Top Paste: Un1(-2.13,2.13) Un2(-2.13,0.71) Un3(-2.13,-0.71) Un4(-2.13,-2.13) Un5(-0.71,2.13) Un6(-0.71,0.71) Un7(-0.71,-0.71) Un8(-0.71,-2.13) Un9(0.71,2.13) Un10(0.71,0.71) Un11(0.71,-0.71) Un12(0.71,-2.13) Un13(2.13,2.13) Un14(2.13,0.71) Un15(2.13,-0.71) Un16(2.13,-2.13)
F.SilkS:
  region: -3.61,3.61 -3.85,3.94 -3.37,3.94
  lines w0.254: -3.61,-3.135 -3.61,-3.61 -3.135,-3.61 ; -3.61,3.135 -3.61,3.37 ; -3.31,3.61 -3.135,3.61 ; 3.135,-3.61 3.61,-3.61 3.61,-3.135 ; 3.135,3.61 3.61,3.61 3.61,3.135
Top Component Center:
  lines w0.127: -0.127,0 0.127,0 -0.127,0 ; 0,-0.127 0,0.127 0,-0.127
Top Assembly:
  region: 3.5,-3.5 -3.5,-3.5 -3.5,2.5 -2.5,3.5 3.5,3.5
Top Courtyard:
  lines w0.254: -4.1,-3.13 -3.75,-3.13 -3.75,-3.75 -3.13,-3.75 -3.13,-4.1 3.13,-4.1 3.13,-3.75 3.75,-3.75 3.75,-3.13 4.1,-3.13 4.1,3.13 3.75,3.13 3.75,3.75 3.13,3.75 3.13,4.1 -3.13,4.1 -3.13,3.75 -3.75,3.75 -3.75,3.13 -4.1,3.13 -4.1,-3.13
Top Designator:
  text ".Designator" at -3.43,-0.344 h1.52
3D body "QFN-48-1EP_7x7mm_P0.5mm_EP5.15x5.15mm.step": height 0.77, standoff 0, extent -3.5,-3.5 3.5,3.5

## QFN-48-1EP_7x7mm_P0.5mm_EP5.7x5.7mm_ThermalVias [mm] "QFN-48-1EP_7x7mm_P0.5mm_EP5.7x5.7mm_ThermalVias"
pads (91):
  rrect25% 0.8x0.25 smd: 1(-3.45,2.75) 2(-3.45,2.25) 3(-3.45,1.75) 4(-3.45,1.25) 5(-3.45,0.75) 6(-3.45,0.25) 7(-3.45,-0.25) 8(-3.45,-0.75) 9(-3.45,-1.25) 10(-3.45,-1.75) 11(-3.45,-2.25) 12(-3.45,-2.75) 25(3.45,-2.75) 26(3.45,-2.25) 27(3.45,-1.75) 28(3.45,-1.25) 29(3.45,-0.75) 30(3.45,-0.25) 31(3.45,0.25) 32(3.45,0.75) 33(3.45,1.25) 34(3.45,1.75) 35(3.45,2.25) 36(3.45,2.75)
  rrect25% 0.25x0.8 smd: 13(-2.75,-3.45) 14(-2.25,-3.45) 15(-1.75,-3.45) 16(-1.25,-3.45) 17(-0.75,-3.45) 18(-0.25,-3.45) 19(0.25,-3.45) 20(0.75,-3.45) 21(1.25,-3.45) 22(1.75,-3.45) 23(2.25,-3.45) 24(2.75,-3.45) 37(2.75,3.45) 38(2.25,3.45) 39(1.75,3.45) 40(1.25,3.45) 41(0.75,3.45) 42(0.25,3.45) 43(-0.25,3.45) 44(-0.75,3.45) 45(-1.25,3.45) 46(-1.75,3.45) 47(-2.25,3.45) 48(-2.75,3.45)
  round 0.5 hole 0.2: 49(-2.6,-2.6) 49(-2.6,-1.3) 49(-2.6,0) 49(-2.6,1.3) 49(-2.6,2.6) 49(-1.3,-2.6) 49(-1.3,-1.3) 49(-1.3,0) 49(-1.3,1.3) 49(-1.3,2.6) 49(0,-2.6) 49(0,-1.3) 49(0,0) 49(0,1.3) 49(0,2.6) 49(1.3,-2.6) 49(1.3,-1.3) 49(1.3,0) 49(1.3,1.3) 49(1.3,2.6) 49(2.6,-2.6) 49(2.6,-1.3) 49(2.6,0) 49(2.6,1.3) 49(2.6,2.6)
  rect 5.7x5.7 smd: 49(0,0)
  rect 5.7x5.7 smd far side: 49(0,0)
  rrect23% 1.1x1.1 on Top Paste: Un1(-2.13,2.13) Un2(-2.13,0.71) Un3(-2.13,-0.71) Un4(-2.13,-2.13) Un5(-0.71,2.13) Un6(-0.71,0.71) Un7(-0.71,-0.71) Un8(-0.71,-2.13) Un9(0.71,2.13) Un10(0.71,0.71) Un11(0.71,-0.71) Un12(0.71,-2.13) Un13(2.13,2.13) Un14(2.13,0.71) Un15(2.13,-0.71) Un16(2.13,-2.13)
F.SilkS:
  region: -3.61,3.61 -3.85,3.94 -3.37,3.94
  lines w0.254: -3.61,-3.135 -3.61,-3.61 -3.135,-3.61 ; -3.61,3.135 -3.61,3.37 ; -3.31,3.61 -3.135,3.61 ; 3.135,-3.61 3.61,-3.61 3.61,-3.135 ; 3.135,3.61 3.61,3.61 3.61,3.135
Top Component Center:
  lines w0.127: -0.127,0 0.127,0 -0.127,0 ; 0,-0.127 0,0.127 0,-0.127
Top Assembly:
  region: 3.5,-3.5 -3.5,-3.5 -3.5,2.5 -2.5,3.5 3.5,3.5
Top Courtyard:
  lines w0.254: -4.1,-3.13 -4.1,3.13 -3.75,3.13 -3.75,3.75 -3.13,3.75 -3.13,4.1 3.13,4.1 3.13,3.75 3.75,3.75 3.75,3.13 4.1,3.13 4.1,-3.13 3.75,-3.13 3.75,-3.75 3.13,-3.75 3.13,-4.1 -3.13,-4.1 -3.13,-3.75 -3.75,-3.75 -3.75,-3.13 -4.1,-3.13
Top Designator:
  text ".Designator" at -3.43,-0.344 h1.52

## QFN-48-1EP_7x7mm_P0.5mm_EP5.15x5.15mm [mm] "QFN-48-1EP_7x7mm_P0.5mm_EP5.15x5.15mm"
pads (65):
  rrect25% 0.875x0.25 smd: 1(-3.437,2.75) 2(-3.437,2.25) 3(-3.437,1.75) 4(-3.437,1.25) 5(-3.437,0.75) 6(-3.437,0.25) 7(-3.437,-0.25) 8(-3.437,-0.75) 9(-3.437,-1.25) 10(-3.437,-1.75) 11(-3.437,-2.25) 12(-3.437,-2.75) 25(3.437,-2.75) 26(3.437,-2.25) 27(3.437,-1.75) 28(3.437,-1.25) 29(3.437,-0.75) 30(3.437,-0.25) 31(3.437,0.25) 32(3.437,0.75) 33(3.437,1.25) 34(3.437,1.75) 35(3.437,2.25) 36(3.437,2.75)
  rrect25% 0.25x0.875 smd: 13(-2.75,-3.437) 14(-2.25,-3.437) 15(-1.75,-3.437) 16(-1.25,-3.437) 17(-0.75,-3.437) 18(-0.25,-3.437) 19(0.25,-3.437) 20(0.75,-3.437) 21(1.25,-3.437) 22(1.75,-3.437) 23(2.25,-3.437) 24(2.75,-3.437) 37(2.75,3.437) 38(2.25,3.437) 39(1.75,3.437) 40(1.25,3.437) 41(0.75,3.437) 42(0.25,3.437) 43(-0.25,3.437) 44(-0.75,3.437) 45(-1.25,3.437) 46(-1.75,3.437) 47(-2.25,3.437) 48(-2.75,3.437)
  rect 5.15x5.15 smd: 49(0,0)
  rrect24% 1.04x1.04 on Top Paste: Un1(-1.935,1.935) Un2(-1.935,0.645) Un3(-1.935,-0.645) Un4(-1.935,-1.935) Un5(-0.645,1.935) Un6(-0.645,0.645) Un7(-0.645,-0.645) Un8(-0.645,-1.935) Un9(0.645,1.935) Un10(0.645,0.645) Un11(0.645,-0.645) Un12(0.645,-1.935) Un13(1.935,1.935) Un14(1.935,0.645) Un15(1.935,-0.645) Un16(1.935,-1.935)
F.SilkS:
  region: -3.61,3.61 -3.85,3.94 -3.37,3.94
  lines w0.254: -3.61,-3.135 -3.61,-3.61 -3.135,-3.61 ; -3.61,3.135 -3.61,3.37 ; -3.31,3.61 -3.135,3.61 ; 3.135,-3.61 3.61,-3.61 3.61,-3.135 ; 3.135,3.61 3.61,3.61 3.61,3.135
Top Component Center:
  lines w0.127: -0.127,0 0.127,0 -0.127,0 ; 0,-0.127 0,0.127 0,-0.127
Top Assembly:
  region: 3.5,-3.5 -3.5,-3.5 -3.5,2.5 -2.5,3.5 3.5,3.5
Top Courtyard:
  lines w0.254: -4.13,-3.13 -3.75,-3.13 -3.75,-3.75 -3.13,-3.75 -3.13,-4.13 3.13,-4.13 3.13,-3.75 3.75,-3.75 3.75,-3.13 4.13,-3.13 4.13,3.13 3.75,3.13 3.75,3.75 3.13,3.75 3.13,4.13 -3.13,4.13 -3.13,3.75 -3.75,3.75 -3.75,3.13 -4.13,3.13 -4.13,-3.13
Top Designator:
  text ".Designator" at -3.43,-0.344 h1.52
3D body "QFN-48-1EP_7x7mm_P0.5mm_EP5.15x5.15mm.step": height 0.77, standoff 0, extent -3.5,-3.5 3.5,3.5

## QFN-48-1EP_7x7mm_P0.5mm_EP5.15x5.15mm_ThermalVias [mm] "QFN-48-1EP_7x7mm_P0.5mm_EP5.15x5.15mm_ThermalVias"
pads (91):
  rrect25% 0.875x0.25 smd: 1(-3.437,2.75) 2(-3.437,2.25) 3(-3.437,1.75) 4(-3.437,1.25) 5(-3.437,0.75) 6(-3.437,0.25) 7(-3.437,-0.25) 8(-3.437,-0.75) 9(-3.437,-1.25) 10(-3.437,-1.75) 11(-3.437,-2.25) 12(-3.437,-2.75) 25(3.437,-2.75) 26(3.437,-2.25) 27(3.437,-1.75) 28(3.437,-1.25) 29(3.437,-0.75) 30(3.437,-0.25) 31(3.437,0.25) 32(3.437,0.75) 33(3.437,1.25) 34(3.437,1.75) 35(3.437,2.25) 36(3.437,2.75)
  rrect25% 0.25x0.875 smd: 13(-2.75,-3.437) 14(-2.25,-3.437) 15(-1.75,-3.437) 16(-1.25,-3.437) 17(-0.75,-3.437) 18(-0.25,-3.437) 19(0.25,-3.437) 20(0.75,-3.437) 21(1.25,-3.437) 22(1.75,-3.437) 23(2.25,-3.437) 24(2.75,-3.437) 37(2.75,3.437) 38(2.25,3.437) 39(1.75,3.437) 40(1.25,3.437) 41(0.75,3.437) 42(0.25,3.437) 43(-0.25,3.437) 44(-0.75,3.437) 45(-1.25,3.437) 46(-1.75,3.437) 47(-2.25,3.437) 48(-2.75,3.437)
  round 0.5 hole 0.2: 49(-2.325,-2.325) 49(-2.325,-1.162) 49(-2.325,0) 49(-2.325,1.162) 49(-2.325,2.325) 49(-1.162,-2.325) 49(-1.162,-1.162) 49(-1.162,0) 49(-1.162,1.162) 49(-1.162,2.325) 49(0,-2.325) 49(0,-1.162) 49(0,0) 49(0,1.162) 49(0,2.325) 49(1.162,-2.325) 49(1.162,-1.162) 49(1.162,0) 49(1.162,1.162) 49(1.162,2.325) 49(2.325,-2.325) 49(2.325,-1.162) 49(2.325,0) 49(2.325,1.162) 49(2.325,2.325)
  rect 5.15x5.15 smd: 49(0,0)
  rect 5.15x5.15 smd far side: 49(0,0)
  rrect25% 1x1 on Top Paste: Un1(-1.935,1.935) Un2(-1.935,0.645) Un3(-1.935,-0.645) Un4(-1.935,-1.935) Un5(-0.645,1.935) Un6(-0.645,0.645) Un7(-0.645,-0.645) Un8(-0.645,-1.935) Un9(0.645,1.935) Un10(0.645,0.645) Un11(0.645,-0.645) Un12(0.645,-1.935) Un13(1.935,1.935) Un14(1.935,0.645) Un15(1.935,-0.645) Un16(1.935,-1.935)
F.SilkS:
  region: -3.61,3.61 -3.85,3.94 -3.37,3.94
  lines w0.254: -3.61,-3.135 -3.61,-3.61 -3.135,-3.61 ; -3.61,3.135 -3.61,3.37 ; -3.31,3.61 -3.135,3.61 ; 3.135,-3.61 3.61,-3.61 3.61,-3.135 ; 3.135,3.61 3.61,3.61 3.61,3.135
Top Component Center:
  lines w0.127: -0.127,0 0.127,0 -0.127,0 ; 0,-0.127 0,0.127 0,-0.127
Top Assembly:
  region: 3.5,-3.5 -3.5,-3.5 -3.5,2.5 -2.5,3.5 3.5,3.5
Top Courtyard:
  lines w0.254: -4.13,-3.13 -4.13,3.13 -3.75,3.13 -3.75,3.75 -3.13,3.75 -3.13,4.13 3.13,4.13 3.13,3.75 3.75,3.75 3.75,3.13 4.13,3.13 4.13,-3.13 3.75,-3.13 3.75,-3.75 3.13,-3.75 3.13,-4.13 -3.13,-4.13 -3.13,-3.75 -3.75,-3.75 -3.75,-3.13 -4.13,-3.13
Top Designator:
  text ".Designator" at -3.43,-0.344 h1.52
3D body "QFN-48-1EP_7x7mm_P0.5mm_EP5.15x5.15mm.step": height 0.77, standoff 0, extent -3.5,-3.5 3.5,3.5

## QFN-48-1EP_7x7mm_P0.5mm_EP5.45x5.45mm [mm] "QFN-48-1EP_7x7mm_P0.5mm_EP5.45x5.45mm"
pads (65):
  rrect25% 0.85x0.25 smd: 1(-3.45,2.75) 2(-3.45,2.25) 3(-3.45,1.75) 4(-3.45,1.25) 5(-3.45,0.75) 6(-3.45,0.25) 7(-3.45,-0.25) 8(-3.45,-0.75) 9(-3.45,-1.25) 10(-3.45,-1.75) 11(-3.45,-2.25) 12(-3.45,-2.75) 25(3.45,-2.75) 26(3.45,-2.25) 27(3.45,-1.75) 28(3.45,-1.25) 29(3.45,-0.75) 30(3.45,-0.25) 31(3.45,0.25) 32(3.45,0.75) 33(3.45,1.25) 34(3.45,1.75) 35(3.45,2.25) 36(3.45,2.75)
  rrect25% 0.25x0.85 smd: 13(-2.75,-3.45) 14(-2.25,-3.45) 15(-1.75,-3.45) 16(-1.25,-3.45) 17(-0.75,-3.45) 18(-0.25,-3.45) 19(0.25,-3.45) 20(0.75,-3.45) 21(1.25,-3.45) 22(1.75,-3.45) 23(2.25,-3.45) 24(2.75,-3.45) 37(2.75,3.45) 38(2.25,3.45) 39(1.75,3.45) 40(1.25,3.45) 41(0.75,3.45) 42(0.25,3.45) 43(-0.25,3.45) 44(-0.75,3.45) 45(-1.25,3.45) 46(-1.75,3.45) 47(-2.25,3.45) 48(-2.75,3.45)
  rect 5.45x5.45 smd: 49(0,0)
  rrect23% 1.1x1.1 on Top Paste: Un1(-2.04,2.04) Un2(-2.04,0.68) Un3(-2.04,-0.68) Un4(-2.04,-2.04) Un5(-0.68,2.04) Un6(-0.68,0.68) Un7(-0.68,-0.68) Un8(-0.68,-2.04) Un9(0.68,2.04) Un10(0.68,0.68) Un11(0.68,-0.68) Un12(0.68,-2.04) Un13(2.04,2.04) Un14(2.04,0.68) Un15(2.04,-0.68) Un16(2.04,-2.04)
F.SilkS:
  region: -3.61,3.61 -3.85,3.94 -3.37,3.94
  lines w0.254: -3.61,-3.135 -3.61,-3.61 -3.135,-3.61 ; -3.61,3.135 -3.61,3.37 ; -3.31,3.61 -3.135,3.61 ; 3.135,-3.61 3.61,-3.61 3.61,-3.135 ; 3.135,3.61 3.61,3.61 3.61,3.135
Top Component Center:
  lines w0.127: -0.127,0 0.127,0 -0.127,0 ; 0,-0.127 0,0.127 0,-0.127
Top Assembly:
  region: 3.5,-3.5 -3.5,-3.5 -3.5,2.5 -2.5,3.5 3.5,3.5
Top Courtyard:
  lines w0.254: -4.13,-3.13 -4.13,3.13 -3.75,3.13 -3.75,3.75 -3.13,3.75 -3.13,4.13 3.13,4.13 3.13,3.75 3.75,3.75 3.75,3.13 4.13,3.13 4.13,-3.13 3.75,-3.13 3.75,-3.75 3.13,-3.75 3.13,-4.13 -3.13,-4.13 -3.13,-3.75 -3.75,-3.75 -3.75,-3.13 -4.13,-3.13
Top Designator:
  text ".Designator" at -3.43,-0.344 h1.52
3D body "QFN-48-1EP_7x7mm_P0.5mm_EP5.15x5.15mm.step": height 0.77, standoff 0, extent -3.5,-3.5 3.5,3.5